# Altium footprint library DIM.PcbLib: 183 footprints (part 11 of 12)
Each footprint in its own frame and in the unit in brackets; x right, y up, seen from the top. Pads: shape width x height; smd on the part's side, far side on the other; paste and mask are expansions set on the pad; w line width, h text height; cw(c..) or ccw(c..) is an arc to the next point about the centre after c.
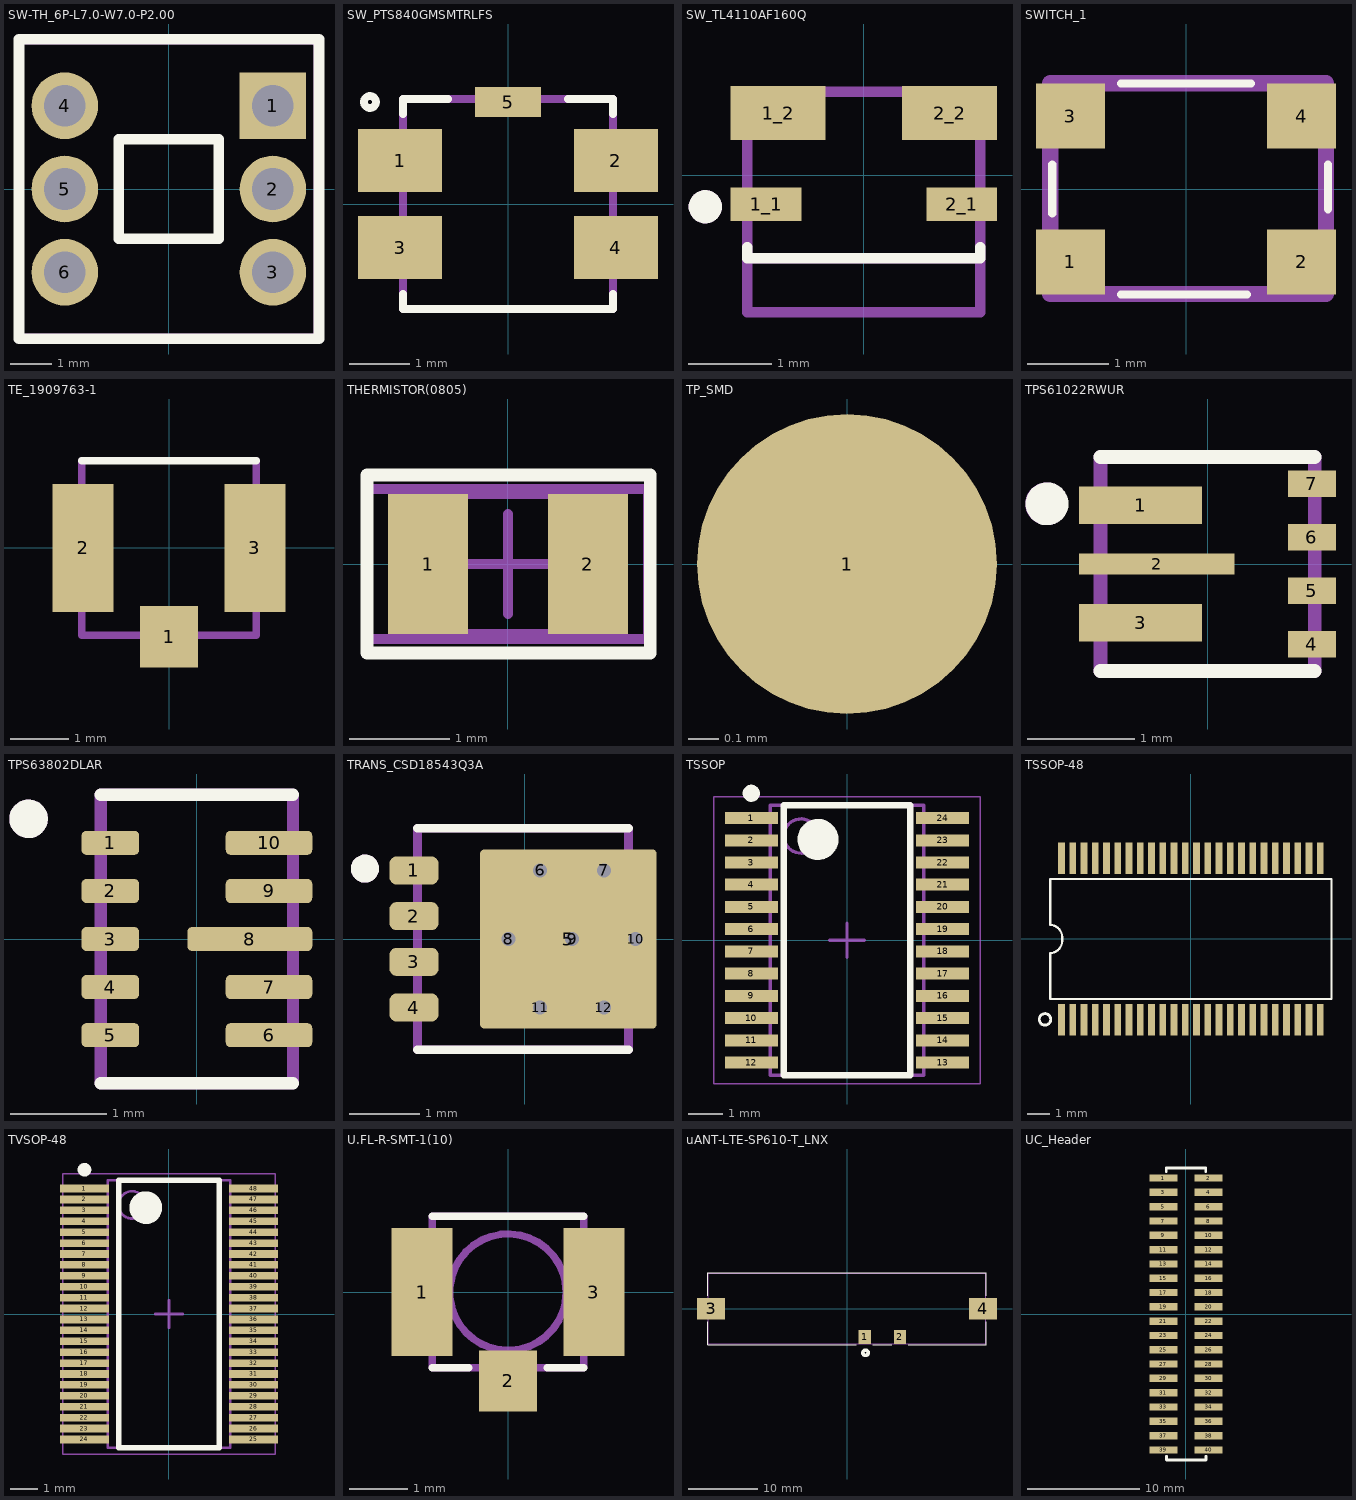
[diagram p10: the footprints below, top view; thin cyan lines are the x and y axes]

## SW-TH_6P-L7.0-W7.0-P2.00 [mm]
pads (6):
  rect 1.6x1.6 hole 1 mask+0.102: 1(2.5,2)
  round 1.6 hole 1 mask+0.102: 2(2.5,0) 3(2.5,-2) 4(-2.5,2) 5(-2.5,0) 6(-2.5,-2)
Top Overlay:
  lines w0.254: -3.6,-3.6 -3.6,3.6 3.607,3.6 3.607,-3.6 -3.6,-3.6 ; -1.2,-1.2 -1.2,1.2 1.2,1.2 1.2,-1.2 -1.2,-1.2
Mechanical 13:
  region: 3.56,3.5 3.56,3.475 3.525,3.44 3.475,3.44 3.44,3.475 3.44,3.5 3.44,3.525 3.475,3.56 3.525,3.56 3.56,3.525 3.56,3.5
  lines w0.051: -3.5,-3.5 3.5,-3.5 3.5,3.5 -3.5,3.5 -3.5,-3.5

## SW_PTS840GMSMTRLFS [mm]
pads (5):
  rect 1.4x1.05 smd: 1(-1.8,0.725) 2(1.8,0.725) 3(-1.8,-0.725) 4(1.8,-0.725)
  rect 1.1x0.5 smd: 5(0,1.7)
Top Overlay:
  circle w0.127: c-2.3,1.7 r0.1
  lines w0.127: -1.75,-1.5 -1.75,-1.75 1.75,-1.75 1.75,-1.5 ; -1.75,1.5 -1.75,1.75 -1,1.75 ; 1,1.75 1.75,1.75 1.75,1.5
Mechanical 13:
  lines w0.127: -1.75,-1.75 -1.75,1.75 1.75,1.75 1.75,-1.75 -1.75,-1.75
3D body "PTS840GMSMTRLFS.stp": height 1.4, standoff 0.05, extent -2.35,-1.501 2.35,2.049

## SW_TL4110AF160Q [mm]
height 0.975
pads (4):
  rect 0.85x0.4 smd paste+0 mask+0.102: 1_1(-1.175,-0.35) 2_1(1.175,-0.35)
  rect 1.14x0.65 smd paste+0 mask+0.102: 1_2(-1.03,0.745) 2_2(1.03,0.745)
Top Overlay:
  circle w0.2: c-1.905,-0.381 r0.1
  lines w0.127: -1.4,-0.87 -1.4,-1 1.4,-1 1.4,-0.87
Mechanical 13:
  circle w0.2: c-1.905,-0.381 r0.1
  lines w0.127: -1.4,-1 1.4,-1 ; -1.4,-1 -1.4,-1.65 1.4,-1.65 1.4,-1 ; -1.4,-1 -1.4,1 1.4,1 1.4,-1
3D body "step_temp.STEP": height 1.02, standoff -1.02, extent -1.4,-1.65 1.4,1

## SWITCH_1 [mm] "TL3700AF100QG"
pads (4):
  rect 0.85x0.8 smd: 1(-1.425,-0.9) 2(1.425,-0.9) 3(-1.425,0.9) 4(1.425,0.9)
Top Overlay:
  lines w0.1: -1.65,-0.3 -1.65,0.3 ; -0.8,-1.3 0.75,-1.3 ; -0.8,1.3 0.8,1.3 ; 1.75,-0.25 1.75,0.3
Mechanical 13:
  lines w0.2: -1.675,-1.295 -1.675,1.305 1.725,1.305 1.725,-1.295 -1.675,-1.295
3D body "TL3700AFxxxQG.stp": height 0.65, standoff 0, extent -1.675,-1.295 1.725,1.305

## TE_1909763-1 [mm]
pads (3):
  rect 1x1.05 smd: 1(0,-1.525)
  rect 1.05x2.2 smd: 2(-1.475,0) 3(1.475,0)
Top Overlay:
  lines w0.127: -1.5,1.5 1.5,1.5
Mechanical 13:
  lines w0.127: -1.5,1.5 -1.5,-1.5 1.5,-1.5 1.5,1.5
3D body "step_temp.STEP": height 1.2, standoff -0.03, extent -1.5,-1.55 1.5,1.55

## THERMISTOR(0805) [mm]
pads (2):
  rect 0.8x1.4 smd: 1(-0.8,0) 2(0.8,0)
Top Overlay:
  lines w0.127: -1.41,-0.889 -1.41,0.889 1.422,0.889 1.422,-0.889 -1.41,-0.889
Mechanical 13:
  lines w0.1: -1.075,-0.7 -1.075,0.7 1.075,0.7 1.075,-0.7 -1.075,-0.7
Mechanical 15:
  lines w0.1: -0.5,0 0.5,0 ; 0,-0.5 0,0.5 ; -1.4,-0.75 -1.4,0.75 1.4,0.75 1.4,-0.75 -1.4,-0.75
3D body: height 0.65, standoff 0, extent -1.075,-0.7 1.075,0.7

## TP_SMD [mm]
pads (1):
  round 1 smd: 1(0,0)

## TPS61022RWUR [mm]
height 1
pads (7):
  rect 1.15x0.35 smd paste-2 mask+0.07: 1(-0.625,0.55) 3(-0.625,-0.55)
  rect 1.45x0.2 smd paste-2 mask+0.07: 2(-0.475,0)
  rect 0.45x0.25 smd mask+0.07: 4(0.975,-0.75) 5(0.975,-0.25) 6(0.975,0.25) 7(0.975,0.75)
Top Overlay:
  circle w0.2: c-1.5,0.562 r0.1
  lines w0.127: -1,-1 1,-1 ; -1,1 1,1
Top Paste:
  region: -0.05,-0.725 -0.525,-0.725 -0.525,-0.375 -0.05,-0.375
  region: -0.725,-0.725 -1.2,-0.725 -1.2,-0.375 -0.725,-0.375
  region: 0.25,-0.1 -0.375,-0.1 -0.375,0.1 0.25,0.1
  region: -0.575,-0.1 -1.2,-0.1 -1.2,0.1 -0.575,0.1
  region: -0.05,0.375 -0.525,0.375 -0.525,0.725 -0.05,0.725
  region: -0.725,0.375 -1.2,0.375 -1.2,0.725 -0.725,0.725
Mechanical 13:
  circle w0.2: c-1.503,0.563 r0.1
  lines w0.127: -1,-1 1,-1 1,1 -1,1 -1,-1
3D body "step_temp.STEP": height 1, standoff 0, extent -1,-1 1,1

## TPS63802DLAR [mm]
height 1
pads (10):
  rrect40% 0.6x0.25 smd mask+0: 1(-0.9,1) 2(-0.9,0.5) 3(-0.9,0) 4(-0.9,-0.5) 5(-0.9,-1)
  rrect40% 0.9x0.25 smd mask+0: 6(0.75,-1) 7(0.75,-0.5) 9(0.75,0.5) 10(0.75,1)
  rrect40% 1.3x0.25 smd paste-2 mask+0: 8(0.55,0)
Top Overlay:
  circle w0.2: c-1.75,1.25 r0.1
  lines w0.127: -1,-1.5 1,-1.5 ; -1,1.5 1,1.5
Top Paste:
  drawing of 2 lines, arcs and shapes, not listed
Top Solder:
  drawing of 10 lines, arcs and shapes, not listed
Mechanical 13:
  circle w0.2: c-1.75,1.25 r0.1
  lines w0.127: -1,-1.5 1,-1.5 1,1.5 -1,1.5 -1,-1.5
3D body: height 1, standoff 0, extent -1,-1.5 1,1.5

## TRANS_CSD18543Q3A [mm]
pads (12):
  rrect50% 0.7x0.4 smd paste-1: 1(-1.576,0.975) 2(-1.576,0.325) 3(-1.576,-0.325) 4(-1.576,-0.975)
  rrect5% 2.51x2.55 smd paste-2: 5(0.619,0)
  round 0.3 hole 0.2: 6(0.219,0.975) 7(1.124,0.975) 8(-0.233,0) 9(0.671,0) 10(1.576,0) 11(0.219,-0.975) 12(1.124,-0.975)
Top Overlay:
  circle w0.2: c-2.272,1 r0.1
  lines w0.127: -1.526,-1.575 1.473,-1.575 ; -1.526,1.575 1.473,1.575
Top Paste:
  drawing of 8 lines, arcs and shapes, not listed
Top Solder:
  drawing of 1 lines, arcs and shapes, not listed
Mechanical 13:
  circle w0.2: c-2.272,1 r0.1
  lines w0.127: -1.526,-1.575 1.473,-1.575 1.473,1.575 -1.526,1.575 -1.526,-1.575
3D body "step_temp.STEP": height 0.9, standoff 0, extent -1.676,-1.725 1.623,1.725

## TSSOP [mm]
height 1.2
pads (24):
  rect 1.55x0.35 smd: 1(-2.8,3.575) 2(-2.8,2.925) 3(-2.8,2.275) 4(-2.8,1.625) 5(-2.8,0.975) 6(-2.8,0.325) 7(-2.8,-0.325) 8(-2.8,-0.975) 9(-2.8,-1.625) 10(-2.8,-2.275) 11(-2.8,-2.925) 12(-2.8,-3.575) 13(2.8,-3.575) 14(2.8,-2.925) 15(2.8,-2.275) 16(2.8,-1.625) 17(2.8,-0.975) 18(2.8,-0.325) 19(2.8,0.325) 20(2.8,0.975) 21(2.8,1.625) 22(2.8,2.275) 23(2.8,2.925) 24(2.8,3.575)
Top Overlay:
  circle w0.6: c-0.85,2.95 r0.3
  circle w0.25: c-2.8,4.3 r0.125
  lines w0.2: -1.85,-3.95 1.85,-3.95 1.85,3.95 -1.85,3.95 -1.85,-3.95
Mechanical 13:
  circle w0.1: c-1.35,3.05 r0.5
  lines w0.1: -2.25,-3.95 2.25,-3.95 2.25,3.95 -2.25,3.95 -2.25,-3.95
Mechanical 15:
  lines w0.05: -3.9,-4.2 3.9,-4.2 3.9,4.2 -3.9,4.2 -3.9,-4.2
  lines w0.1: -0.5,0 0.5,0 ; 0,-0.5 0,0.5
3D body: height 1.2, standoff 0.15, extent -2.25,-3.95 2.25,3.95

## TSSOP-48 [mm]
pads (48):
  rect 0.3x1.4 smd: 1(-5.75,-3.6) 2(-5.25,-3.6) 3(-4.75,-3.6) 4(-4.25,-3.6) 5(-3.75,-3.6) 6(-3.25,-3.6) 7(-2.75,-3.6) 8(-2.25,-3.6) 9(-1.75,-3.6) 10(-1.25,-3.6) 11(-0.75,-3.6) 12(-0.25,-3.6) 13(0.25,-3.6) 14(0.75,-3.6) 15(1.25,-3.6) 16(1.75,-3.6) 17(2.25,-3.6) 18(2.75,-3.6) 19(3.25,-3.6) 20(3.75,-3.6) 21(4.25,-3.6) 22(4.75,-3.6) 23(5.25,-3.6) 24(5.75,-3.6) 25(5.75,3.6) 26(5.25,3.6) 27(4.75,3.6) 28(4.25,3.6) 29(3.75,3.6) 30(3.25,3.6) 31(2.75,3.6) 32(2.25,3.6) 33(1.75,3.6) 34(1.25,3.6) 35(0.75,3.6) 36(0.25,3.6) 37(-0.25,3.6) 38(-0.75,3.6) 39(-1.25,3.6) 40(-1.75,3.6) 41(-2.25,3.6) 42(-2.75,3.6) 43(-3.25,3.6) 44(-3.75,3.6) 45(-4.25,3.6) 46(-4.75,3.6) 47(-5.25,3.6) 48(-5.75,3.6)
Top Overlay:
  circle w0.127: c-6.487,-3.575 r0.255
  lines w0.102: -6.25,-0.635 ccw(c-6.3,-0.05) -5.715,0 ccw(c-6.3,0.05) -6.25,0.635
  lines w0.107: -6.25,-0.635 -6.25,-2.667 6.25,-2.667 6.25,2.667 -6.25,2.667 -6.25,0.635
3D body: height 3, standoff 0, extent -6.258,-2.914 6.239,2.877

## TVSOP-48 [mm]
height 1.2
pads (48):
  rect 1.8x0.28 smd: 1(-3.1,4.6) 2(-3.1,4.2) 3(-3.1,3.8) 4(-3.1,3.4) 5(-3.1,3) 6(-3.1,2.6) 7(-3.1,2.2) 8(-3.1,1.8) 9(-3.1,1.4) 10(-3.1,1) 11(-3.1,0.6) 12(-3.1,0.2) 13(-3.1,-0.2) 14(-3.1,-0.6) 15(-3.1,-1) 16(-3.1,-1.4) 17(-3.1,-1.8) 18(-3.1,-2.2) 19(-3.1,-2.6) 20(-3.1,-3) 21(-3.1,-3.4) 22(-3.1,-3.8) 23(-3.1,-4.2) 24(-3.1,-4.6) 25(3.1,-4.6) 26(3.1,-4.2) 27(3.1,-3.8) 28(3.1,-3.4) 29(3.1,-3) 30(3.1,-2.6) 31(3.1,-2.2) 32(3.1,-1.8) 33(3.1,-1.4) 34(3.1,-1) 35(3.1,-0.6) 36(3.1,-0.2) 37(3.1,0.2) 38(3.1,0.6) 39(3.1,1) 40(3.1,1.4) 41(3.1,1.8) 42(3.1,2.2) 43(3.1,2.6) 44(3.1,3) 45(3.1,3.4) 46(3.1,3.8) 47(3.1,4.2) 48(3.1,4.6)
Top Overlay:
  circle w0.6: c-0.85,3.9 r0.3
  circle w0.25: c-3.1,5.29 r0.125
  lines w0.2: -1.85,-4.9 1.85,-4.9 1.85,4.9 -1.85,4.9 -1.85,-4.9
Mechanical 13:
  circle w0.1: c-1.35,4 r0.5
  lines w0.1: -2.25,-4.9 2.25,-4.9 2.25,4.9 -2.25,4.9 -2.25,-4.9
Mechanical 15:
  lines w0.05: -3.9,-5.15 3.9,-5.15 3.9,5.15 -3.9,5.15 -3.9,-5.15
  lines w0.1: -0.5,0 0.5,0 ; 0,-0.5 0,0.5
3D body: height 1.2, standoff 0.1, extent -2.25,-4.9 2.25,4.9

## U.FL-R-SMT-1(10) [mm]
pads (3):
  rect 1.05x2.2 smd: 1(-1.475,0) 3(1.475,0)
  rect 1x1.05 smd: 2(0,-1.525)
Top Overlay:
  lines w0.127: -1.3,-1.3 -0.67,-1.3 ; -1.3,1.3 1.3,1.3 ; 0.67,-1.3 1.3,-1.3
Mechanical 13:
  circle w0.127: c0,0 r1
  circle w0.127: c0,0 r1
  lines w0.127: -1.3,-1.3 -1.3,1.3 ; -1.3,-1.3 1.3,-1.3 ; -1.3,-1.3 -1.3,1.3 ; -1.3,-1.3 1.3,-1.3 ; -1.3,1.3 1.3,1.3 ; -1.3,1.3 1.3,1.3 ; 1.3,-1.3 1.3,1.3 ; 1.3,-1.3 1.3,1.3
3D body "U.FL-R-SMT-1.stp": height 1.25, standoff 0, extent -1.5,-1.525 1.5,1.575

## uANT-LTE-SP610-T_LNX [mil]
pads (4):
  rect 70x80 smd paste+0: 1(100,-160) 2(300,-160)
  rect 160x120 smd paste+0: 3(-770,0) 4(770,0)
Top Overlay:
  circle w20: c105,-250 r15
  lines w6: -790,-73.1 -790,-205 52.89,-205 ; -790,73.1 -790,205 790,205 790,73.1 ; 147.11,-205 252.89,-205 ; 347.11,-205 790,-205 790,-73.1
Bottom Overlay:
  circle w20: c105,-250 r15
Mechanical 13:
  lines w1: -785,-200 -785,200 785,200 785,-200 -785,-200
3D body "ANT-LTE-SP610-T.STEP": height 110.24, standoff 0, extent -785.43,-196.84 789.37,196.86

## UC_Header [mm]
pads (40):
  rect 2.5x0.65 smd: 1(-2,12.065) 2(2,12.065) 3(-2,10.795) 4(2,10.795) 5(-2,9.525) 6(2,9.525) 7(-2,8.255) 8(2,8.255) 9(-2,6.985) 10(2,6.985) 11(-2,5.715) 12(2,5.715) 13(-2,4.445) 14(2,4.445) 15(-2,3.175) 16(2,3.175) 17(-2,1.905) 18(2,1.905) 19(-2,0.635) 20(2,0.635) 21(-2,-0.635) 22(2,-0.635) 23(-2,-1.905) 24(2,-1.905) 25(-2,-3.175) 26(2,-3.175) 27(-2,-4.445) 28(2,-4.445) 29(-2,-5.715) 30(2,-5.715) 31(-2,-6.985) 32(2,-6.985) 33(-2,-8.255) 34(2,-8.255) 35(-2,-9.525) 36(2,-9.525) 37(-2,-10.795) 38(2,-10.795) 39(-2,-12.065) 40(2,-12.065)
Top Overlay:
  lines w0.254: -1.75,12.624 -1.75,12.954 1.75,12.954 1.75,12.624 ; -1.727,-12.625 -1.727,-12.954 1.773,-12.954 1.773,-12.625